# Altium footprint library PcbLib1.PcbLib: 5 footprints
Each footprint in its own frame and in the unit in brackets; x right, y up, seen from the top. Pads: shape width x height; smd on the part's side, far side on the other; paste and mask are expansions set on the pad; w line width, h text height; cw(c..) or ccw(c..) is an arc to the next point about the centre after c.
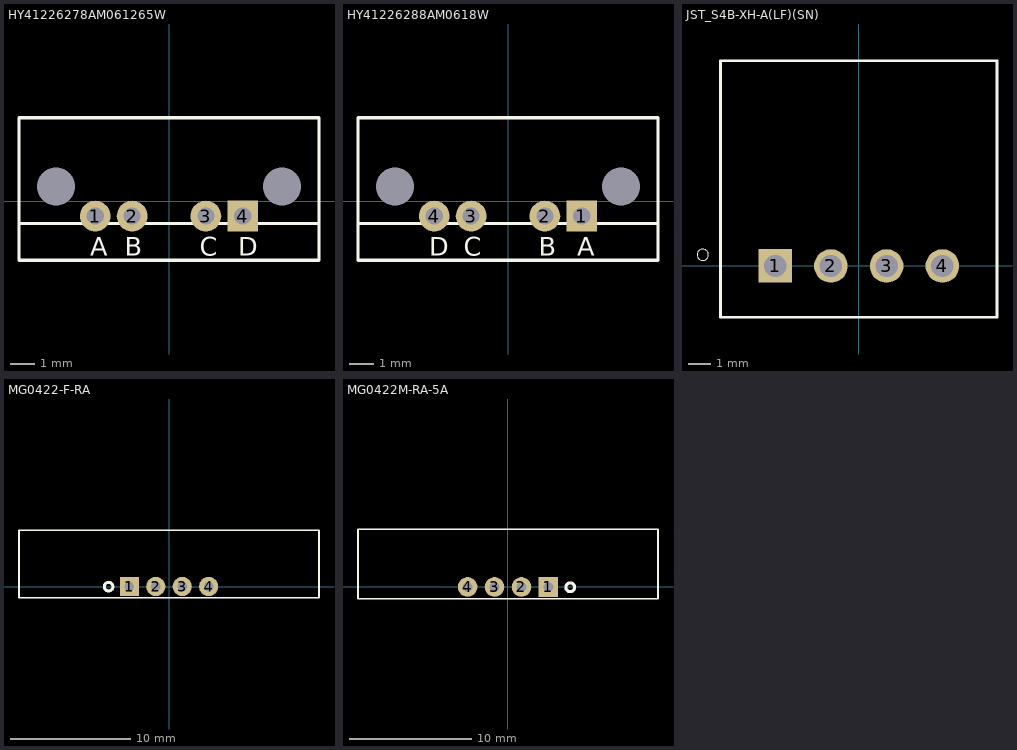
[diagram p0: the footprints below, top view; thin cyan lines are the x and y axes]

## HY41226278AM061265W [mm]
pads (6):
  round 1.25 hole 0.7: 1(-3,-0.6) 2(-1.5,-0.6) 3(1.5,-0.6)
  rect 1.25x1.25 hole 0.7: 4(3,-0.6)
  round 0 hole 1.55 unplated: MH(-4.6,0.6) MH(4.6,0.6)
Top Overlay:
  lines w0.127: -6.1,-0.9 6.1,-0.9 ; -6.1,-0.9 -6.1,3.4 6.1,3.4 6.1,-0.9 ; -6.1,-0.9 6.1,-0.9 ; -6.1,-0.9 -6.1,-2.4 6.1,-2.4 6.1,-0.9
  text "A" at -3.2,-2.21 h0.76
  text "B" at -1.803,-2.21 h0.76
  text "C" at 1.245,-2.21 h0.76
  text "D" at 2.819,-2.21 h0.76
3D body "HY41226278AM061265W.STEP": height 4.9, standoff -1.7, extent -6.1,-2.102 6.1,6.898

## HY41226288AM0618W [mm]
pads (6):
  rect 1.25x1.25 hole 0.7: 1(3,-0.6)
  round 1.25 hole 0.7: 2(1.5,-0.6) 3(-1.5,-0.6) 4(-3,-0.6)
  round 0 hole 1.55 unplated: MH(4.6,0.6) MH1(-4.6,0.6)
Top Overlay:
  lines w0.127: -6.1,-0.9 6.1,-0.9 ; -6.1,-0.9 -6.1,-2.4 6.1,-2.4 6.1,-0.9 ; -6.1,-0.9 6.1,-0.9 ; -6.1,-0.9 -6.1,3.4 6.1,3.4 6.1,-0.9
  text "A" at 2.819,-2.21 h0.76
  text "B" at 1.245,-2.21 h0.76
  text "C" at -1.803,-2.21 h0.76
  text "D" at -3.2,-2.21 h0.76
3D body "HY41226288AM0618W.STEP": height 4.9, standoff -1.7, extent -6.1,-2.102 6.1,7.898

## JST_S4B-XH-A(LF)(SN) [mm]
pads (4):
  rect 1.508x1.508 / inner round 1.508 / far side rect 1.508x1.508 hole 1: 1(-3.75,0)
  round 1.508 hole 1: 2(-1.25,0) 3(1.25,0) 4(3.75,0)
Top Overlay:
  circle w0: c-7,0.5 r0.254
  lines w0.127: -6.2,-2.3 -6.2,9.2 6.2,9.2 6.2,-2.3 -6.2,-2.3
3D body "step_temp.STEP": height 6.15, standoff -3.4, extent -6.175,-2.321 6.225,9.179

## MG0422-F-RA [mm]
pads (4):
  rect 1.6x1.6 hole 0.8: 1(-3.3,0)
  round 1.6 hole 0.8: 2(-1.1,0) 3(1.1,0) 4(3.3,0)
Top Overlay:
  circle w0.254: c-5.034,-0.011 r0.359
  lines w0.127: -12.5,-0.95 12.5,-0.95 12.5,4.7 -12.5,4.7 -12.5,-0.95
3D body "MG0422-F-RA (1).STEP": height 7.05, standoff -2.45, extent -12.5,-0.291 12.5,7.909

## MG0422M-RA-5A [mm]
pads (4):
  rect 1.6x1.6 hole 0.8: 1(3.3,0)
  round 1.6 hole 0.8: 2(1.1,0) 3(-1.1,0) 4(-3.3,0)
Top Overlay:
  circle w0.254: c5.08,-0.025 r0.359
  lines w0.127: -12.25,-0.95 12.25,-0.95 12.25,4.7 -12.25,4.7 -12.25,-0.95
3D body "MG0422M-RA-5A.STEP": height 6.55, standoff -2.45, extent -12.25,-0.352 12.25,6.848